# Altium schematic symbol library MAX20078ATEV&plus_T.SchLib: 1 symbol
Pins are listed as number, name and electrical type; pins without a type are passive.

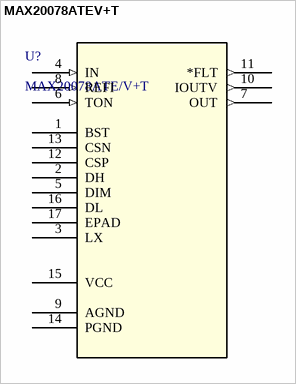
[diagram p0: symbol MAX20078ATEV+T]

## MAX20078ATEV+T
designator U?, comment MAX20078ATE/V+T
Synchronous Buck, High-Brightness LED Controller; Manufacturer_Name: Analog Devices Inc; Copyright: Copyright (C) 2026 Ultra Librarian. All rights reserved.; Manufacturer_Part_Number: MAX20078ATE/V+T; RefDes: RefDes; Type: Type
footprint 21-0136V_T1633+4C_MXM
pins: 1 BST, 2 DH, 3 LX, 4 IN (in), 5 DIM, 6 TON (in), 7 OUT (out), 8 REFI (in), 9 AGND (power), 10 IOUTV (out), 11 *FLT (out), 12 CSP, 13 CSN, 14 PGND (power), 15 VCC (power), 16 DL, 17 EPAD